# Altium schematic symbol library LMH13000RQER.SchLib: 1 symbol
Pins are listed as number, name and electrical type; pins without a type are passive.

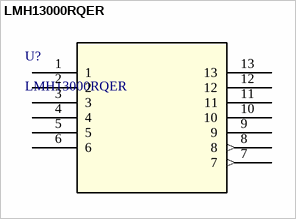
[diagram p0: symbol LMH13000RQER]

## LMH13000RQER
designator U?
High-speed, voltage-controlled current output driver 13-WQFN-HR -40 to 125; Manufacturer_Name: Texas Instruments; Copyright: Copyright (C) 2025 Ultra Librarian. All rights reserved.; Manufacturer_Part_Number: LMH13000RQER; RefDes: RefDes; Type: Type
footprint XLMH13000RQER.A_WQFN-HR_TXI_TEX
pins: 1, 2, 3 (power), 4 (power), 5 (power), 6 (power), 7 (out), 8 (out), 9, 10, 11, 12, 13